# Altium schematic symbol library MICROFJ-60035-TSV-TR.SchLib: 1 symbol
Pins are listed as number, name and electrical type; pins without a type are passive.

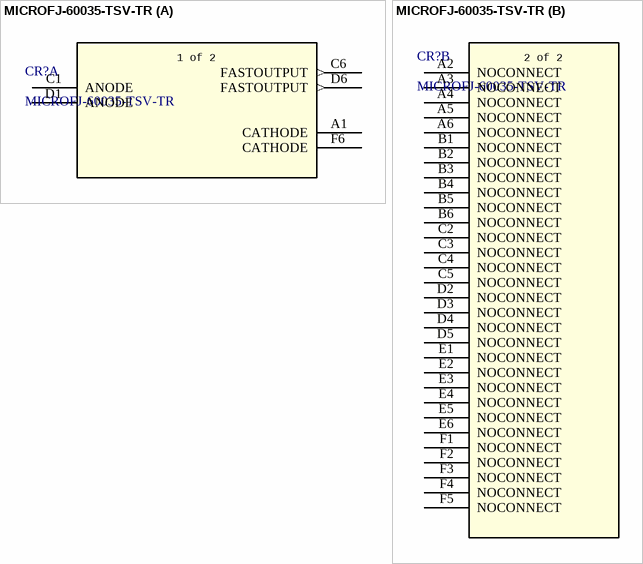
[diagram p0: symbol MICROFJ-60035-TSV-TR]

## MICROFJ-60035-TSV-TR
designator CR?
Description; Manufacturer_Name: onsemi; Copyright: Copyright (C) 2026 Ultra Librarian. All rights reserved.; Manufacturer_Part_Number: MICROFJ-60035-TSV-TR; RefDes: RefDes; Type: Type
footprint MicroFJ-60035-TSV_OSI
part A pins: A1 CATHODE, C1 ANODE, C6 FASTOUTPUT (out), D1 ANODE, D6 FASTOUTPUT (out), F6 CATHODE
part B pins: A2 NOCONNECT, A3 NOCONNECT, A4 NOCONNECT, A5 NOCONNECT, A6 NOCONNECT, B1 NOCONNECT, B2 NOCONNECT, B3 NOCONNECT, B4 NOCONNECT, B5 NOCONNECT, B6 NOCONNECT, C2 NOCONNECT, C3 NOCONNECT, C4 NOCONNECT, C5 NOCONNECT, D2 NOCONNECT, D3 NOCONNECT, D4 NOCONNECT, D5 NOCONNECT, E1 NOCONNECT, E2 NOCONNECT, E3 NOCONNECT, E4 NOCONNECT, E5 NOCONNECT, E6 NOCONNECT, F1 NOCONNECT, F2 NOCONNECT, F3 NOCONNECT, F4 NOCONNECT, F5 NOCONNECT
part A text: 1 of 2
part B text: 2 of 2